# Altium footprint library APE-SBC.PcbLib: 65 footprints (part 1 of 5)
Each footprint in its own frame and in the unit in brackets; x right, y up, seen from the top. Pads: shape width x height; smd on the part's side, far side on the other; paste and mask are expansions set on the pad; w line width, h text height; cw(c..) or ccw(c..) is an arc to the next point about the centre after c.
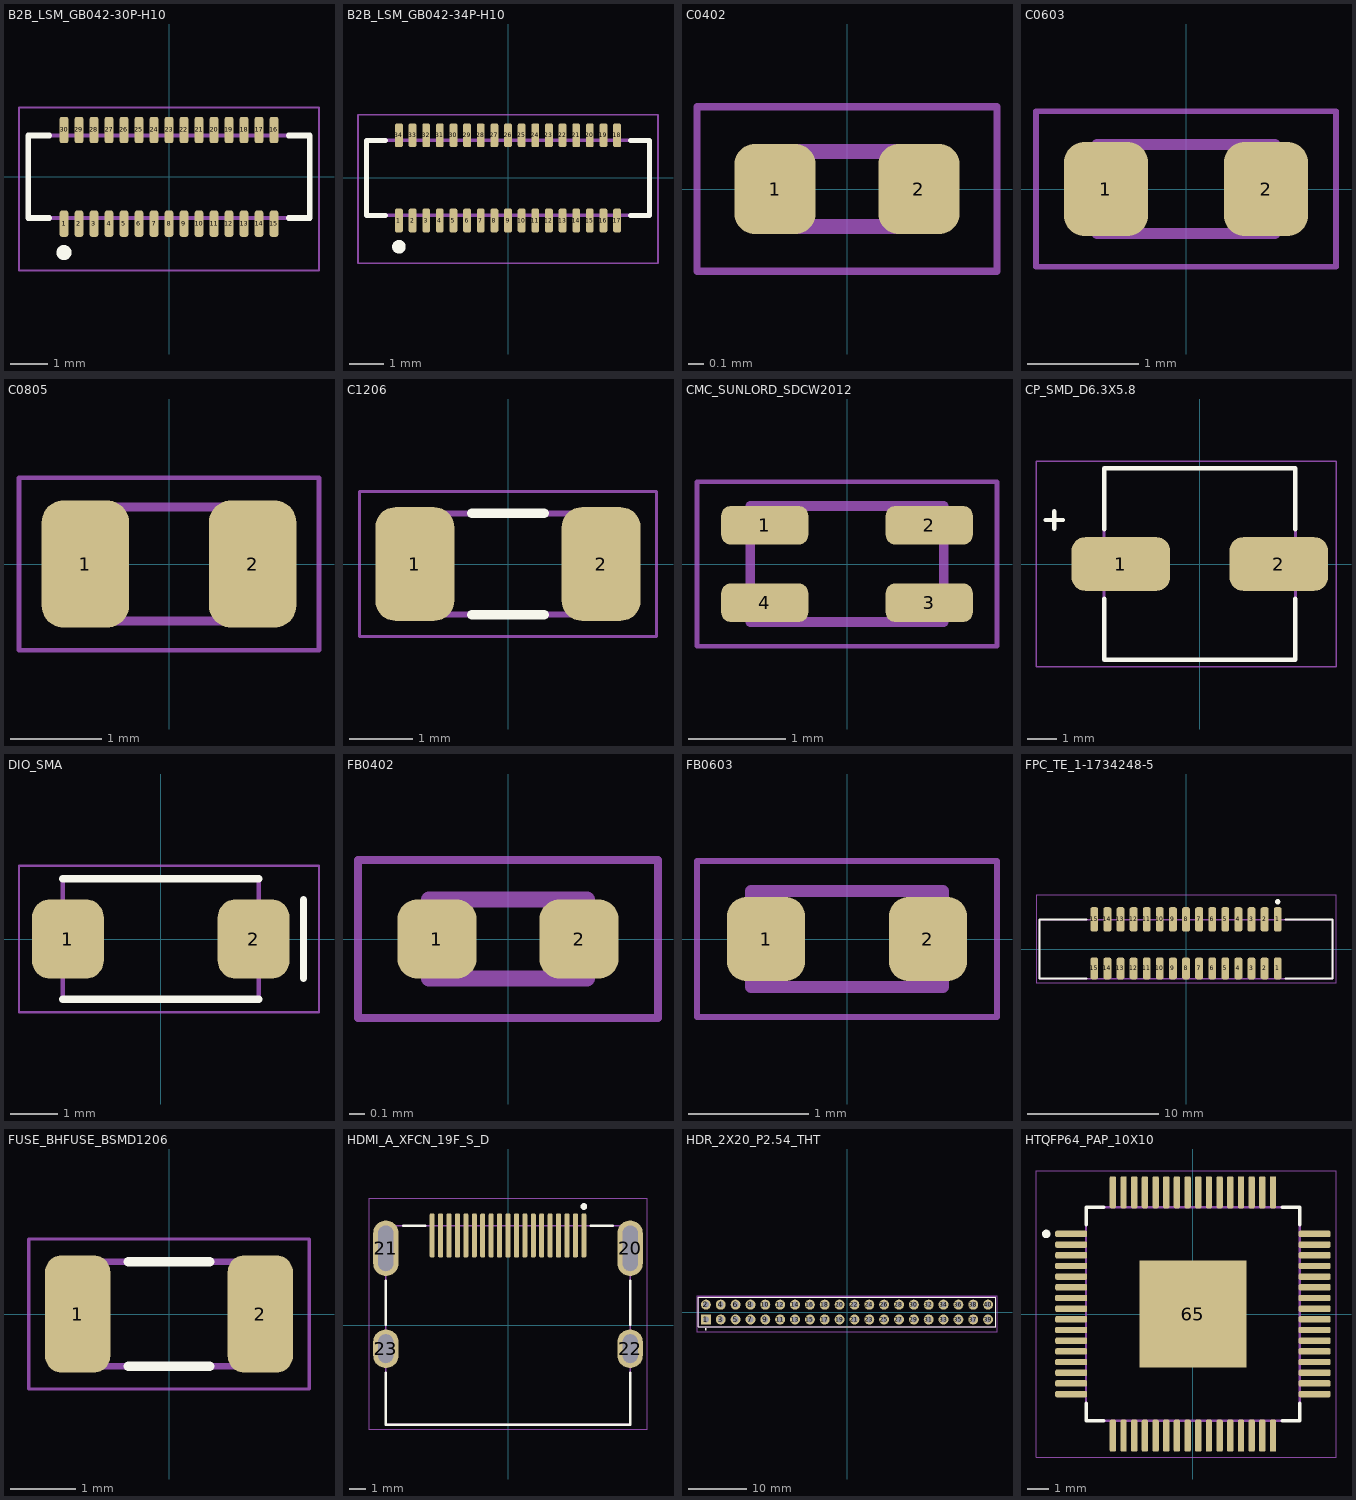
[diagram p0: the footprints below, top view; thin cyan lines are the x and y axes]

## B2B_LSM_GB042-30P-H10 [mm] "LS Mtron GB042-30P-H10 0.4 mm board-to-board plug, 30 contacts, 1.0 mm stack, no hold-downs"
pads (30):
  rrect50% 0.23x0.7 smd: 1(-2.8,-1.25) 2(-2.4,-1.25) 3(-2,-1.25) 4(-1.6,-1.25) 5(-1.2,-1.25) 6(-0.8,-1.25) 7(-0.4,-1.25) 8(0,-1.25) 9(0.4,-1.25) 10(0.8,-1.25) 11(1.2,-1.25) 12(1.6,-1.25) 13(2,-1.25) 14(2.4,-1.25) 15(2.8,-1.25) 16(2.8,1.25) 17(2.4,1.25) 18(2,1.25) 19(1.6,1.25) 20(1.2,1.25) 21(0.8,1.25) 22(0.4,1.25) 23(0,1.25) 24(-0.4,1.25) 25(-0.8,1.25) 26(-1.2,1.25) 27(-1.6,1.25) 28(-2,1.25) 29(-2.4,1.25) 30(-2.8,1.25)
Top Overlay:
  circle w0.2: c-2.8,-2.02 r0.1
  lines w0.15: -3.19,-1.1 -3.75,-1.1 -3.75,1.1 -3.19,1.1 ; 3.19,-1.1 3.75,-1.1 3.75,1.1 3.19,1.1
Mechanical 13:
  lines w0.1: -3.75,-1.1 -3.75,1.1 3.75,1.1 3.75,-1.1 -3.75,-1.1
Mechanical 15:
  lines w0.05: -4,-2.5 -4,1.85 4,1.85 4,-2.5 -4,-2.5

## B2B_LSM_GB042-34P-H10 [mm] "LS Mtron GB042-34P-H10 0.4 mm board-to-board plug, 34 contacts, 1.0 mm stack, no hold-downs"
pads (34):
  rrect50% 0.23x0.7 smd: 1(-3.2,-1.25) 2(-2.8,-1.25) 3(-2.4,-1.25) 4(-2,-1.25) 5(-1.6,-1.25) 6(-1.2,-1.25) 7(-0.8,-1.25) 8(-0.4,-1.25) 9(0,-1.25) 10(0.4,-1.25) 11(0.8,-1.25) 12(1.2,-1.25) 13(1.6,-1.25) 14(2,-1.25) 15(2.4,-1.25) 16(2.8,-1.25) 17(3.2,-1.25) 18(3.2,1.25) 19(2.8,1.25) 20(2.4,1.25) 21(2,1.25) 22(1.6,1.25) 23(1.2,1.25) 24(0.8,1.25) 25(0.4,1.25) 26(0,1.25) 27(-0.4,1.25) 28(-0.8,1.25) 29(-1.2,1.25) 30(-1.6,1.25) 31(-2,1.25) 32(-2.4,1.25) 33(-2.8,1.25) 34(-3.2,1.25)
Top Overlay:
  circle w0.2: c-3.2,-2.02 r0.1
  lines w0.15: -3.59,-1.1 -4.15,-1.1 -4.15,1.1 -3.59,1.1 ; 3.59,-1.1 4.15,-1.1 4.15,1.1 3.59,1.1
Mechanical 13:
  lines w0.1: -4.15,-1.1 -4.15,1.1 4.15,1.1 4.15,-1.1 -4.15,-1.1
Mechanical 15:
  lines w0.05: -4.4,-2.5 -4.4,1.85 4.4,1.85 4.4,-2.5 -4.4,-2.5

## C0402 [mm] "MLCC 0402 (1005), Samsung reflow land"
pads (2):
  rrect50% 0.54x0.6 smd: 1(-0.48,0) 2(0.48,0)
Mechanical 13:
  lines w0.1: -0.5,-0.25 0.5,-0.25 0.5,0.25 -0.5,0.25 -0.5,-0.25
Mechanical 15:
  lines w0.05: -1,-0.55 1,-0.55 1,0.55 -1,0.55 -1,-0.55

## C0603 [mm] "MLCC 0603 (1608), Samsung reflow land"
pads (2):
  rrect50% 0.76x0.85 smd: 1(-0.72,0) 2(0.72,0)
Mechanical 13:
  lines w0.1: -0.8,-0.4 -0.8,0.4 0.8,0.4 0.8,-0.4 -0.8,-0.4
Mechanical 15:
  lines w0.05: -1.35,-0.7 -1.35,0.7 1.35,0.7 1.35,-0.7 -1.35,-0.7

## C0805 [mm] "MLCC 0805 (2012), Samsung reflow land"
pads (2):
  rrect50% 0.96x1.4 smd: 1(-0.92,0) 2(0.92,0)
Mechanical 13:
  lines w0.1: -1,-0.625 1,-0.625 1,0.625 -1,0.625 -1,-0.625
Mechanical 15:
  lines w0.05: -1.65,-0.95 1.65,-0.95 1.65,0.95 -1.65,0.95 -1.65,-0.95

## C1206 [mm] "MLCC 1206 (3216), Samsung reflow land"
pads (2):
  rrect50% 1.25x1.8 smd: 1(-1.475,0) 2(1.475,0)
Top Overlay:
  lines w0.15: -0.575,-0.8 0.575,-0.8 ; -0.575,0.8 0.575,0.8
Mechanical 13:
  lines w0.1: -1.6,-0.8 -1.6,0.8 1.6,0.8 1.6,-0.8 -1.6,-0.8
Mechanical 15:
  lines w0.05: -2.35,-1.15 -2.35,1.15 2.35,1.15 2.35,-1.15 -2.35,-1.15

## CMC_SUNLORD_SDCW2012 [mm] "Sunlord SDCW2012 common-mode choke 2.0x1.2 mm, 4 pads (A 1-2, B 4-3), Sunlord recommended land"
pads (4):
  rrect50% 0.9x0.4 smd: 1(-0.85,0.4) 2(0.85,0.4) 3(0.85,-0.4) 4(-0.85,-0.4)
Mechanical 13:
  lines w0.1: -1,-0.6 -1,0.6 1,0.6 1,-0.6 -1,-0.6
Mechanical 15:
  lines w0.05: -1.55,-0.85 -1.55,0.85 1.55,0.85 1.55,-0.85 -1.55,-0.85

## CP_SMD_D6.3X5.8 [mm] "Polymer aluminium capacitor D6.3 x L5.8 SMD (6.6 mm base), IPC-7351B nominal land, pad 1 = +"
pads (2):
  rrect50% 3.4x1.85 smd: 1(-2.725,0) 2(2.725,0)
Top Overlay:
  lines w0.15: -5.32,1.52 -4.72,1.52 ; -5.02,1.22 -5.02,1.82 ; -3.3,-1.2 -3.3,-3.3 3.3,-3.3 3.3,-1.2 ; -3.3,1.2 -3.3,3.3 3.3,3.3 3.3,1.2
Mechanical 13:
  lines w0.1: -3.3,-3.3 -3.3,3.3 3.3,3.3 3.3,-3.3 -3.3,-3.3
Mechanical 15:
  lines w0.05: -5.65,-3.55 -5.65,3.55 4.7,3.55 4.7,-3.55 -5.65,-3.55

## DIO_SMA [mm] "SMA (DO-214AC) diode, pad 1 anode / pad 2 cathode, MDD suggested pad layout"
pads (2):
  rrect50% 1.52x1.68 smd: 1(-1.965,0) 2(1.965,0)
Top Overlay:
  lines w0.15: -2.075,-1.275 2.075,-1.275 ; -2.075,1.275 2.075,1.275 ; 3.02,-0.84 3.02,0.84
Mechanical 13:
  lines w0.1: -2.075,-1.275 -2.075,1.275 2.075,1.275 2.075,-1.275 -2.075,-1.275
Mechanical 15:
  lines w0.05: -3,-1.55 -3,1.55 3.35,1.55 3.35,-1.55 -3,-1.55

## FB0402 [mm] "Ferrite bead 0402 (1005), Murata BLM15P reflow land"
pads (2):
  rrect50% 0.5x0.5 smd: 1(-0.45,0) 2(0.45,0)
Mechanical 13:
  lines w0.1: -0.5,-0.25 -0.5,0.25 0.5,0.25 0.5,-0.25 -0.5,-0.25
Mechanical 15:
  lines w0.05: -0.95,-0.5 -0.95,0.5 0.95,0.5 0.95,-0.5 -0.95,-0.5

## FB0603 [mm] "Ferrite bead 0603 (1608), Murata BLM18P/S/K reflow land"
pads (2):
  rrect50% 0.65x0.7 smd: 1(-0.675,0) 2(0.675,0)
Mechanical 13:
  lines w0.1: -0.8,-0.4 0.8,-0.4 0.8,0.4 -0.8,0.4 -0.8,-0.4
Mechanical 15:
  lines w0.05: -1.25,-0.65 1.25,-0.65 1.25,0.65 -1.25,0.65 -1.25,-0.65

## FPC_TE_1-1734248-5 [mm] "TE 1-1734248-5 15-pos 1.0 mm FPC connector, ZIF vertical, SMT, two tails per circuit"
pads (30):
  rrect50% 0.6x1.65 smd: 1(7,-1.475) 2(6,-1.475) 3(5,-1.475) 4(4,-1.475) 5(3,-1.475) 6(2,-1.475) 7(1,-1.475) 8(0,-1.475) 9(-1,-1.475) 10(-2,-1.475) 11(-3,-1.475) 12(-4,-1.475) 13(-5,-1.475) 14(-6,-1.475) 15(-7,-1.475)
  rrect50% 0.6x1.85 smd: 1(7,2.275) 2(6,2.275) 3(5,2.275) 4(4,2.275) 5(3,2.275) 6(2,2.275) 7(1,2.275) 8(0,2.275) 9(-1,2.275) 10(-2,2.275) 11(-3,2.275) 12(-4,2.275) 13(-5,2.275) 14(-6,2.275) 15(-7,2.275)
Top Overlay:
  circle w0.2: c7,3.62 r0.1
  lines w0.15: -7.575,-2.25 -11.2,-2.25 -11.2,2.25 -7.575,2.25 ; 7.575,-2.25 11.2,-2.25 11.2,2.25 7.575,2.25
Mechanical 13:
  lines w0.1: -11.2,-2.25 11.2,-2.25 11.2,2.25 -11.2,2.25 -11.2,-2.25
Mechanical 15:
  lines w0.05: -11.45,-2.55 11.45,-2.55 11.45,4.1 -11.45,4.1 -11.45,-2.55

## FUSE_BHFUSE_BSMD1206 [mm] "PTC resettable fuse 1206, BHFUSE BSMD1206 recommended pad layout"
pads (2):
  rrect50% 1x1.8 smd: 1(-1.4,0) 2(1.4,0)
Top Overlay:
  lines w0.15: -0.625,-0.8 0.625,-0.8 ; -0.625,0.8 0.625,0.8
Mechanical 13:
  lines w0.1: -1.6,-0.8 1.6,-0.8 1.6,0.8 -1.6,0.8 -1.6,-0.8
Mechanical 15:
  lines w0.05: -2.15,-1.15 2.15,-1.15 2.15,1.15 -2.15,1.15 -2.15,-1.15

## HDMI_A_XFCN_19F_S_D [mm] "XFCN HDMI-A-19F-S-D HDMI type-A receptacle, 19 SMD contacts 0.5 mm + 4 plated shell slots"
pads (23):
  rrect50% 0.3x2.6 smd: 1(4.5,5.32) 2(4,5.32) 3(3.5,5.32) 4(3,5.32) 5(2.5,5.32) 6(2,5.32) 7(1.5,5.32) 8(1,5.32) 9(0.5,5.32) 10(0,5.32) 11(-0.5,5.32) 12(-1,5.32) 13(-1.5,5.32) 14(-2,5.32) 15(-2.5,5.32) 16(-3,5.32) 17(-3.5,5.32) 18(-4,5.32) 19(-4.5,5.32)
  oval 1.5x3.3 hole 0.9 slot 2.7 at 90 deg: 20(7.25,4.56) 21(-7.25,4.56)
  oval 1.5x2.3 hole 0.9 slot 1.7 at 90 deg: 22(7.25,-1.4) 23(-7.25,-1.4)
Top Overlay:
  circle w0.2: c4.5,7.04 r0.1
  lines w0.15: -7.25,-2.825 -7.25,-5.9 7.25,-5.9 7.25,-2.825 ; -7.25,0.025 -7.25,2.635 ; -6.225,5.9 -4.925,5.9 ; 4.925,5.9 6.225,5.9 ; 7.25,0.025 7.25,2.635
Mechanical 13:
  lines w0.1: -7.25,-5.9 7.25,-5.9 7.25,5.9 -7.25,5.9 -7.25,-5.9
Mechanical 15:
  lines w0.05: -8.25,-6.19 8.25,-6.19 8.25,7.51 -8.25,7.51 -8.25,-6.19

## HDR_2X20_P2.54_THT [mm] "Pin header 2x20 2.54 mm THT, Raspberry Pi 40-pin numbering (HanElectricity 2541WV-2x20P)"
pads (40):
  rect 1.7x1.7 hole 1: 1(-24.13,-1.27)
  round 1.7 hole 1: 2(-24.13,1.27) 3(-21.59,-1.27) 4(-21.59,1.27) 5(-19.05,-1.27) 6(-19.05,1.27) 7(-16.51,-1.27) 8(-16.51,1.27) 9(-13.97,-1.27) 10(-13.97,1.27) 11(-11.43,-1.27) 12(-11.43,1.27) 13(-8.89,-1.27) 14(-8.89,1.27) 15(-6.35,-1.27) 16(-6.35,1.27) 17(-3.81,-1.27) 18(-3.81,1.27) 19(-1.27,-1.27) 20(-1.27,1.27) 21(1.27,-1.27) 22(1.27,1.27) 23(3.81,-1.27) 24(3.81,1.27) 25(6.35,-1.27) 26(6.35,1.27) 27(8.89,-1.27) 28(8.89,1.27) 29(11.43,-1.27) 30(11.43,1.27) 31(13.97,-1.27) 32(13.97,1.27) 33(16.51,-1.27) 34(16.51,1.27) 35(19.05,-1.27) 36(19.05,1.27) 37(21.59,-1.27) 38(21.59,1.27) 39(24.13,-1.27) 40(24.13,1.27)
Top Overlay:
  circle w0.2: c-24.13,-2.92 r0.1
  lines w0.15: -25.4,-2.5 25.4,-2.5 25.4,2.5 -25.4,2.5 -25.4,-2.5
Mechanical 13:
  lines w0.1: -25.4,-2.5 25.4,-2.5 25.4,2.5 -25.4,2.5 -25.4,-2.5
Mechanical 15:
  lines w0.05: -25.65,-3.4 25.65,-3.4 25.65,2.75 -25.65,2.75 -25.65,-3.4

## HTQFP64_PAP_10X10 [mm] "TI HTQFP-64 PowerPAD (PAP), 10x10 mm, 0.5 mm pitch, 5.0 mm exposed pad (TFP410)"
pads (65):
  rrect50% 1.5x0.3 smd: 1(-5.7,3.75) 2(-5.7,3.25) 3(-5.7,2.75) 4(-5.7,2.25) 5(-5.7,1.75) 6(-5.7,1.25) 7(-5.7,0.75) 8(-5.7,0.25) 9(-5.7,-0.25) 10(-5.7,-0.75) 11(-5.7,-1.25) 12(-5.7,-1.75) 13(-5.7,-2.25) 14(-5.7,-2.75) 15(-5.7,-3.25) 16(-5.7,-3.75) 33(5.7,-3.75) 34(5.7,-3.25) 35(5.7,-2.75) 36(5.7,-2.25) 37(5.7,-1.75) 38(5.7,-1.25) 39(5.7,-0.75) 40(5.7,-0.25) 41(5.7,0.25) 42(5.7,0.75) 43(5.7,1.25) 44(5.7,1.75) 45(5.7,2.25) 46(5.7,2.75) 47(5.7,3.25) 48(5.7,3.75)
  rrect50% 0.3x1.5 smd: 17(-3.75,-5.7) 18(-3.25,-5.7) 19(-2.75,-5.7) 20(-2.25,-5.7) 21(-1.75,-5.7) 22(-1.25,-5.7) 23(-0.75,-5.7) 24(-0.25,-5.7) 25(0.25,-5.7) 26(0.75,-5.7) 27(1.25,-5.7) 28(1.75,-5.7) 29(2.25,-5.7) 30(2.75,-5.7) 31(3.25,-5.7) 32(3.75,-5.7) 49(3.75,5.7) 50(3.25,5.7) 51(2.75,5.7) 52(2.25,5.7) 53(1.75,5.7) 54(1.25,5.7) 55(0.75,5.7) 56(0.25,5.7) 57(-0.25,5.7) 58(-0.75,5.7) 59(-1.25,5.7) 60(-1.75,5.7) 61(-2.25,5.7) 62(-2.75,5.7) 63(-3.25,5.7) 64(-3.75,5.7)
  rect 5x5 smd: 65(0,0)
Top Overlay:
  circle w0.2: c-6.87,3.75 r0.1
  lines w0.15: -5,-4.175 -5,-5 -4.175,-5 ; -5,4.175 -5,5 -4.175,5 ; 4.175,-5 5,-5 5,-4.175 ; 4.175,5 5,5 5,4.175
Mechanical 13:
  lines w0.1: -5,-5 -5,5 5,5 5,-5 -5,-5
Mechanical 15:
  lines w0.05: -7.35,-6.7 -7.35,6.7 6.7,6.7 6.7,-6.7 -7.35,-6.7